# Altium schematic symbol library MOD_BUCK_MP1584.SchLib: 1 symbol
Pins are listed as number, name and electrical type; pins without a type are passive.

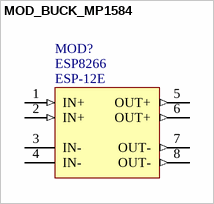
[diagram p0: symbol MOD_BUCK_MP1584]

## MOD_BUCK_MP1584
designator MOD?  value ESP8266  SCH_Footprint: ESP-12E
pins: 1 IN+ (in) "Reset", 2 IN+ (in) "Reset", 3 IN- (power) "Reset", 4 IN- (power) "Reset", 5 OUT+ (out) "Reset", 6 OUT+ (out) "Reset", 7 OUT- (out) "Reset", 8 OUT- (out) "Reset"